# Altium footprint library Brian_.PcbLib: 66 footprints (part 3 of 5)
Each footprint in its own frame and in the unit in brackets; x right, y up, seen from the top. Pads: shape width x height; smd on the part's side, far side on the other; paste and mask are expansions set on the pad; w line width, h text height; cw(c..) or ccw(c..) is an arc to the next point about the centre after c.
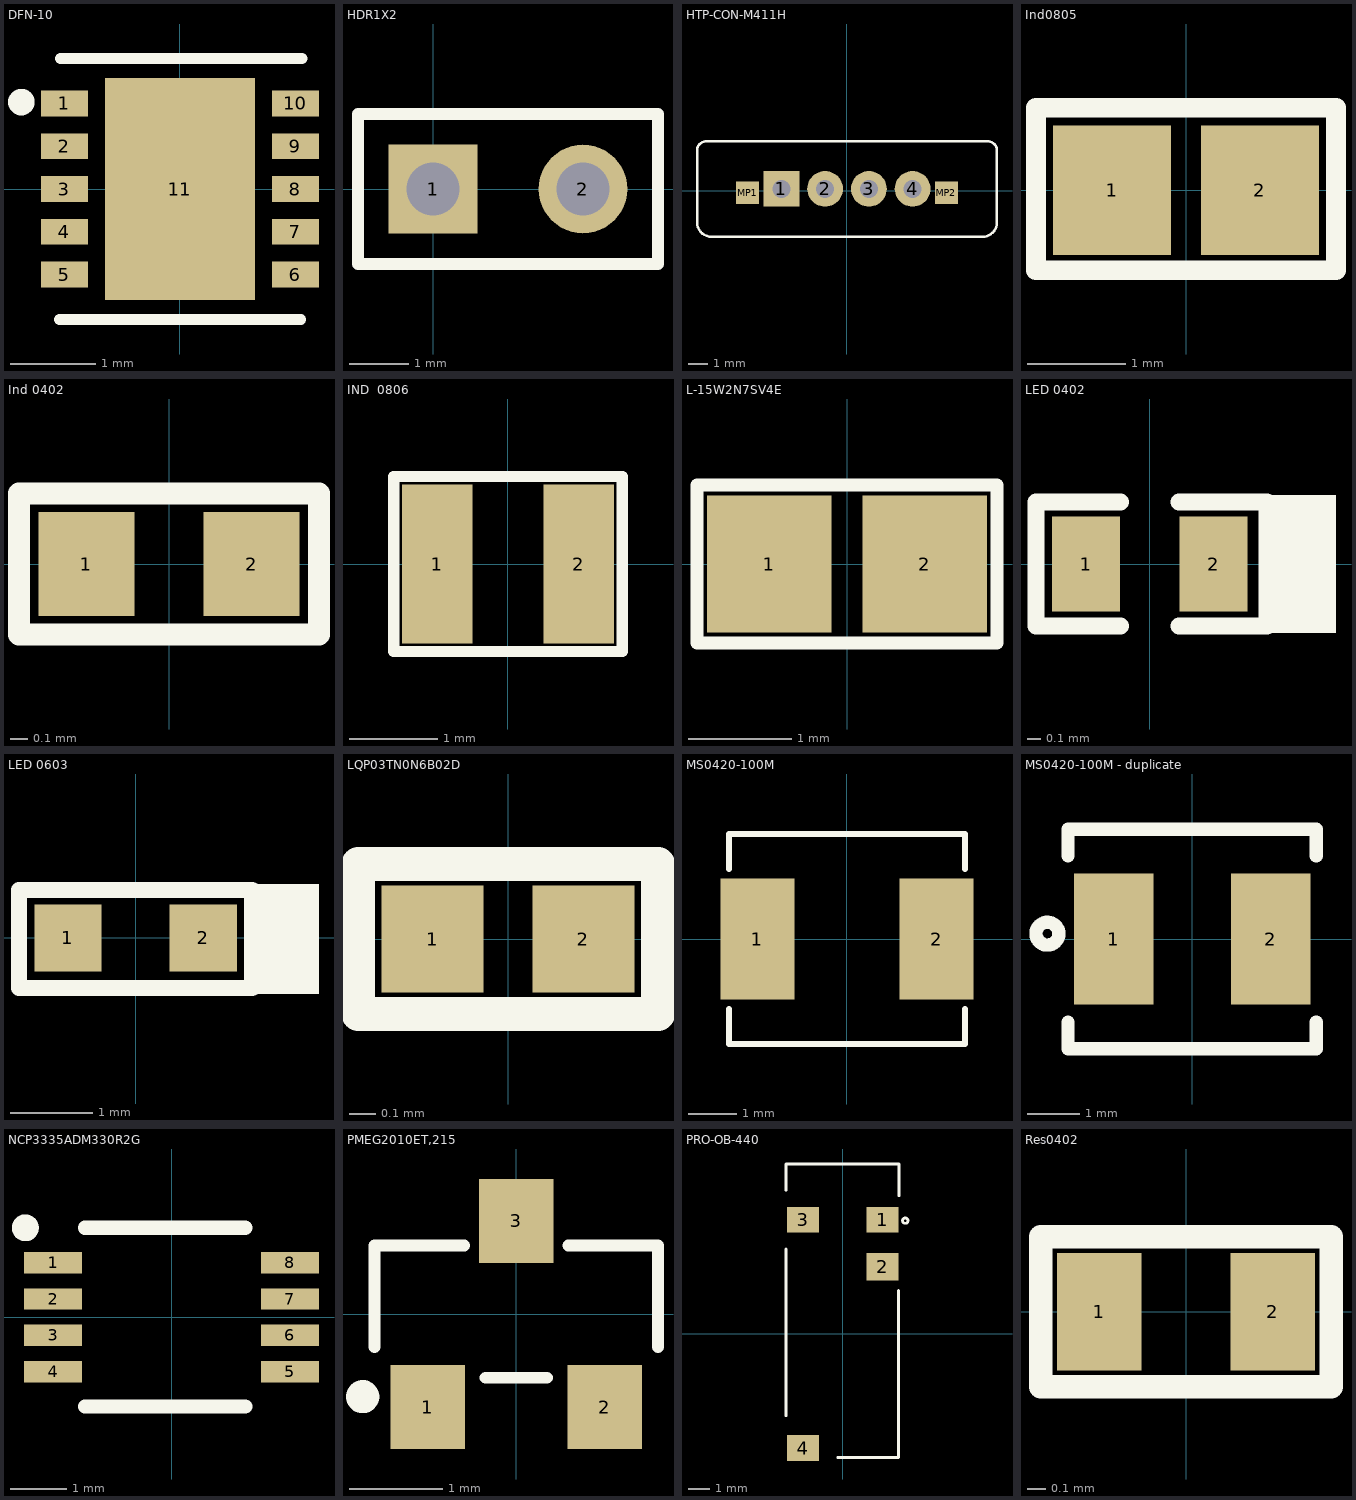
[diagram p2: the footprints below, top view; thin cyan lines are the x and y axes]

## DFN-10 [mm] "33V 4A DFN-10 DC-DC Converters RoHS"
pads (11):
  rect 0.55x0.3 smd: 1(-1.35,1) 2(-1.35,0.5) 3(-1.35,0) 4(-1.35,-0.5) 5(-1.35,-1) 6(1.35,-1) 7(1.35,-0.5) 8(1.35,0) 9(1.35,0.5) 10(1.35,1)
  rect 1.75x2.6 smd: 11(0,0)
Top Overlay:
  circle w0.254: c-1.854,1.016 r0.027
  lines w0.127: -1.408,-1.524 1.412,-1.524 ; -1.395,1.524 1.424,1.524
3D body "User Library-DFN-10.STEP": height 0.8, standoff 0, extent -1.5,-1.501 1.5,1.499

## HDR1X2 [mm] "CONN HEADER VERT 2POS 2.54MM"
pads (2):
  rect 1.5x1.5 hole 0.9: 1(0,0)
  round 1.5 hole 0.9: 2(2.54,0)
Top Overlay:
  lines w0.2: -1.27,-1.27 3.81,-1.27 3.81,1.27 -1.27,1.27 -1.27,-1.27
3D body "User Library-Header1x2.STEP": height 8.44, standoff -2.54, extent -1.27,-1.27 3.81,1.27

## HTP-CON-M411H [mm]
pads (6):
  rect 1.8x1.8 hole 0.9: 1(-3.3,0.1)
  round 1.8 hole 0.9: 2(-1.1,0.1) 3(1.1,0.1) 4(3.3,0.1)
  rect 1.15x1.15 smd: MP1(-5,-0.1) MP2(5,-0.1)
Top Overlay:
  lines w0.127: -7.544,-1.6 ccw(c-6.82,-1.587) -6.807,-2.311 6.807,-2.311 ccw(c6.82,-1.587) 7.544,-1.6 7.544,1.981 ccw(c7.087,2.032) 7.137,2.489 -7.137,2.489 ccw(c-7.087,2.032) -7.544,1.981 -7.544,-1.6
3D body "pogo_connector_female_4-pin.stp": height 6.74, standoff -6.03, extent -7.5,-2.248 7.5,2.452

## Ind0805 [mm] "Inductor 0805"
pads (2):
  rect 1.2x1.32 smd: 1(-0.75,0) 2(0.75,0)
Top Overlay:
  lines w0.2: -1.524,-0.813 -1.524,0.838 1.524,0.838 1.524,-0.813 -1.524,-0.813
3D body "45637.stp": height 0.47, standoff -0.03, extent -1,-0.625 1,0.625

## Ind 0402 [mm]
pads (2):
  rect 0.55x0.6 smd: 1(-0.475,0) 2(0.475,0)
Top Overlay:
  lines w0.127: -0.864,-0.406 0.864,-0.406 0.864,0.406 -0.864,0.406 -0.864,-0.406
3D body "LQG15HN7N5J02D.STEP": height 0.48, standoff -0.02, extent -0.5,-0.279 0.5,0.271

## IND  0806 [mm] "1uH ±20% 3.6A 0806 Inductors (SMD) RoHS"
pads (2):
  rect 0.8x1.8 smd: 1(-0.8,0) 2(0.8,0)
Top Overlay:
  lines w0.127: -1.295,-0.991 1.295,-0.991 1.295,0.991 -1.295,0.991 -1.295,-0.991
3D body "DFE201610E-1R0M=P2.STEP": height 1, standoff 0, extent -1,-0.8 1,0.8

## L-15W2N7SV4E [mm] "FIXED IND 2.7NH 800MA 80MOHM SMD"
pads (2):
  rect 1.2x1.32 smd: 1(-0.75,0) 2(0.75,0)
Top Overlay:
  lines w0.127: -1.448,-0.762 -1.448,0.762 1.448,0.762 1.448,-0.762 -1.448,-0.762
3D body "45637.stp": height 0.47, standoff -0.03, extent -1,-0.625 1,0.625

## LED 0402 [mm] "Green 520~535nm 0402 Light Emitting Diodes (LED) RoHS"
pads (2):
  rect 0.5x0.7 smd: 1(-0.47,0) 2(0.47,0)
Top Overlay:
  rectangle: 0.864,-0.508 1.372,0.508
  lines w0.127: -0.216,-0.457 -0.838,-0.457 -0.838,0.457 -0.216,0.457 ; 0.216,-0.457 0.864,-0.457 0.864,0.457 0.216,0.457
3D body "APHHS1005.STEP": height 0.5, standoff 0, extent -0.5,-0.25 0.5,0.25

## LED 0603 [mm]
pads (2):
  rect 0.82x0.82 smd: 1(-0.825,0) 2(0.825,0)
Top Overlay:
  region: 2.235,0.66 1.422,0.66 1.422,-0.686 2.235,-0.686
  lines w0.2: -1.422,-0.61 -1.422,0.584 1.422,0.584 1.422,-0.61 -1.422,-0.61
3D body "User Library-SMD LED 0603.step": height 0.38, standoff -0.01, extent -0.8,-0.4 0.8,0.4

## LQP03TN0N6B02D [mm] "FIXED IND 0.6NH 850MA 70MOHM SMD"
pads (2):
  rect 0.38x0.4 smd mask+0.055: 1(-0.281,0) 2(0.281,0)
Top Overlay:
  lines w0.127: -0.559,-0.279 0.559,-0.279 0.559,0.279 -0.559,0.279 -0.559,-0.279
3D body "LQP03TN0N6B02D.STEP": height 0.26, standoff -0.07, extent -0.295,-0.15 0.305,0.15

## MS0420-100M [mm]
pads (2):
  rect 1.52x2.5 smd: 1(-1.85,0) 2(1.85,0)
Top Overlay:
  lines w0.127: -2.438,-1.448 -2.438,-2.172 0.102,-2.172 ; -2.438,1.448 -2.438,2.172 0.102,2.172 ; 0,-2.172 2.438,-2.172 2.438,-1.448 ; 0,2.172 2.438,2.172 2.438,1.448
3D body "ms0420-100m.stp": height 1.98, standoff -0.01, extent -2.375,-2.1 2.375,2.1

## MS0420-100M - duplicate [mm]
pads (2):
  rect 1.52x2.5 smd: 1(-1.5,0) 2(1.5,0)
Top Overlay:
  circle w0.254: c-2.769,0.102 r0.218
  lines w0.254: -2.375,-1.588 -2.375,-2.1 0,-2.1 2.375,-2.1 2.375,-1.588 ; -2.375,1.588 -2.375,2.1 0,2.1 2.375,2.1 2.375,1.588

## NCP3335ADM330R2G [mm]
pads (8):
  rect 1.04x0.38 smd: 1(-2.12,0.975) 2(-2.12,0.325) 3(-2.12,-0.325) 4(-2.12,-0.975) 5(2.12,-0.975) 6(2.12,-0.325) 7(2.12,0.325) 8(2.12,0.975)
Top Overlay:
  circle w0.254: c-2.616,1.6 r0.114
  lines w0.254: -1.549,-1.6 1.321,-1.6 ; -1.549,1.6 1.321,1.6
3D body "User Library-MSOP-8 MSOP-8L.step": height 1.01, standoff 0, extent -2.46,-1.525 2.46,1.525

## PMEG2010ET,215 [mm]
pads (3):
  rect 0.8x0.9 smd: 1(-0.95,-1) 2(0.95,-1) 3(0,1)
Top Overlay:
  circle w0.254: c-1.651,-0.889 r0.051
  lines w0.127: -1.524,-0.356 -1.524,0.737 -0.559,0.737 ; -0.33,-0.686 0.33,-0.686 ; 0.559,0.737 1.524,0.737 1.524,-0.356
3D body "SOT23_NXP.step": height 1.09, standoff 0, extent -1.499,-1.25 1.499,1.25

## PRO-OB-440 [mm] "RF ANT 2.4GHZ STAMPED MET SLD"
pads (4):
  rect 1.5x1.2 smd: 1(1.865,5.35) 3(-1.865,5.35) 4(-1.865,-5.35)
  rect 1.5x1.28 smd: 2(1.865,3.15)
Top Overlay:
  circle w0.127: c2.921,5.309 r0.127
  lines w0.127: -2.667,-3.835 -2.667,3.975 ; -2.667,6.731 -2.667,7.963 2.629,7.963 2.629,6.477 ; -0.241,-5.791 2.603,-5.791 2.603,2.032
3D body "PRO-OB-440--3DModel-STEP-1.STEP": height 3.5, standoff -0.03, extent -2.615,-5.744 2.615,8.005

## Res0402 [mil]
pads (2):
  rect 18x25 smd mask+4: 1(-18.5,0) 2(18.5,0)
Top Overlay:
  lines w0.13: -32,-17 32,-17
  lines w5: -31,-16 31,-16 31,16 -31,16 -31,-16
3D body "User Library-RES_1005-0402.step": height 16.14, standoff 0, extent -22.63,-10.82 22.64,10.83